# Altium footprint library Other.PcbLib: 67 footprints (part 2 of 5)
Each footprint in its own frame and in the unit in brackets; x right, y up, seen from the top. Pads: shape width x height; smd on the part's side, far side on the other; paste and mask are expansions set on the pad; w line width, h text height; cw(c..) or ccw(c..) is an arc to the next point about the centre after c.
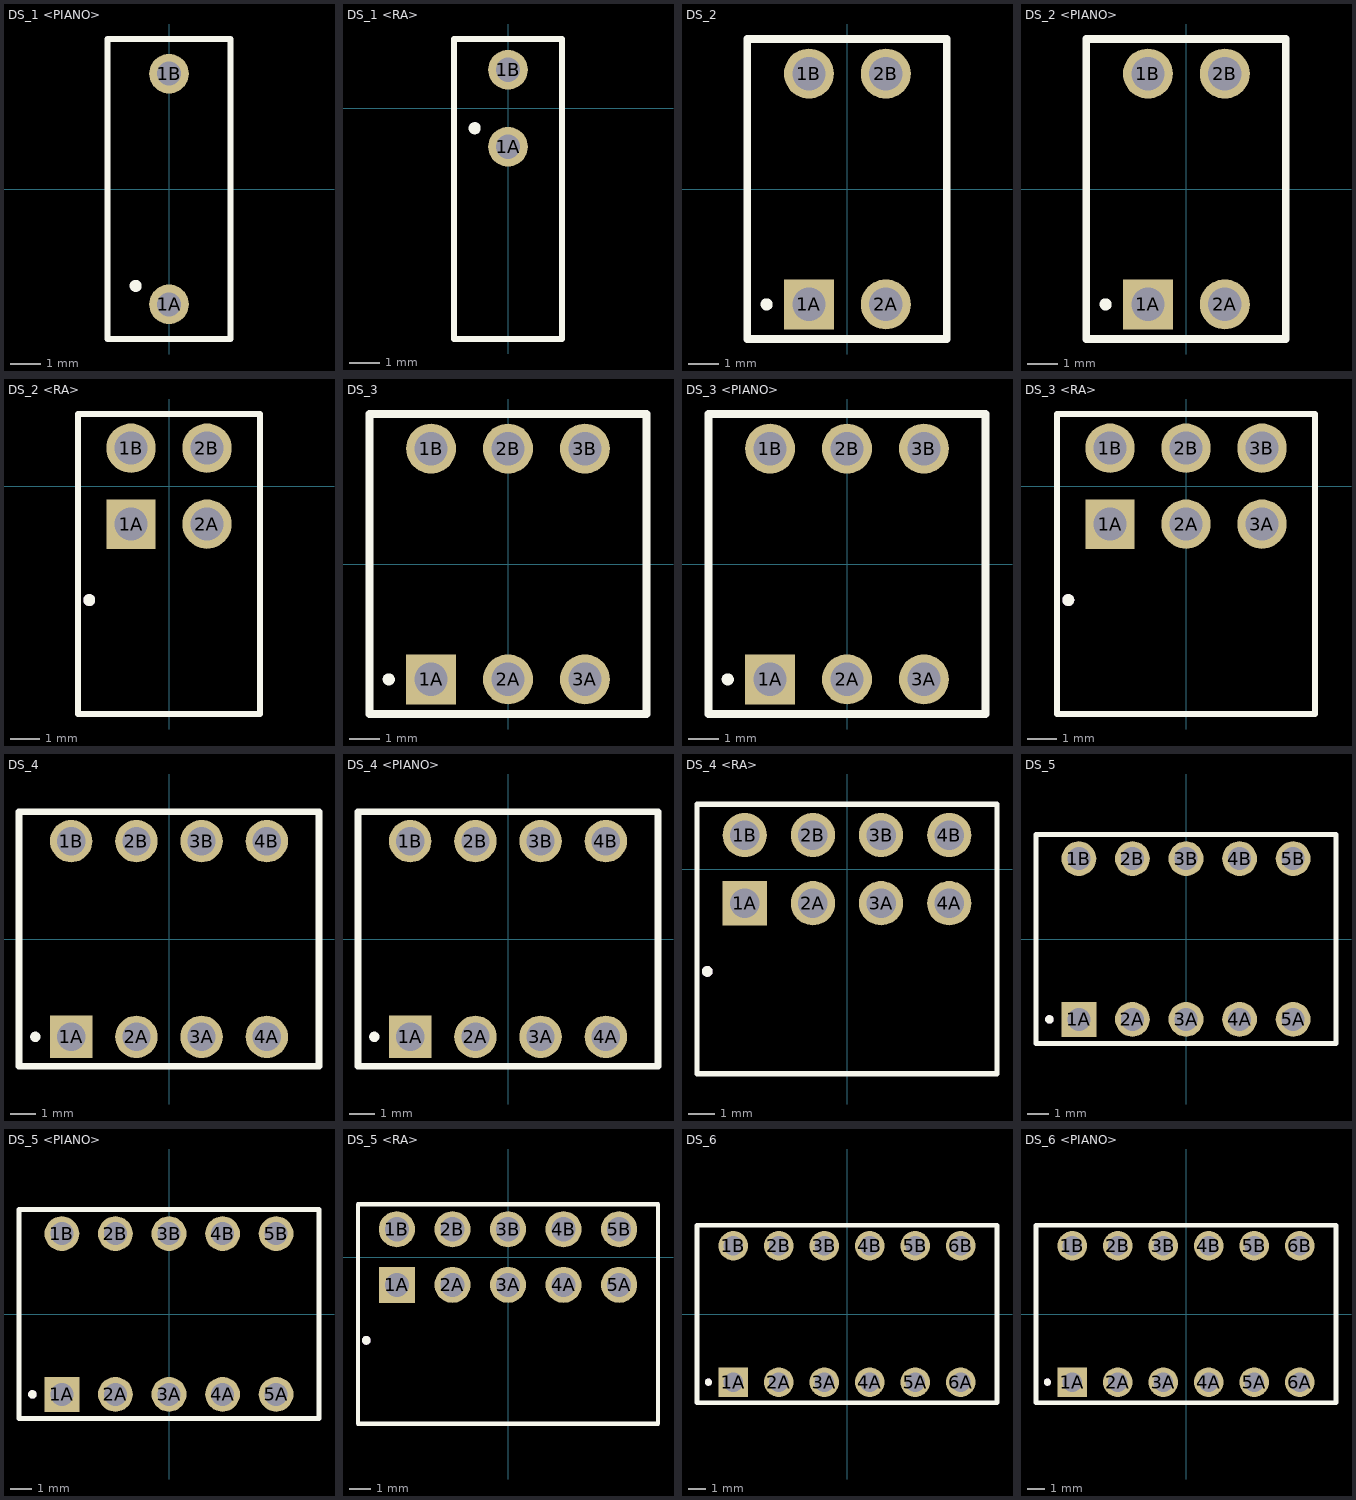
[diagram p1: the footprints below, top view; thin cyan lines are the x and y axes]

## DS_1 <PIANO> [mm]
pads (2):
  round 1.308 hole 0.8: 1A(0,-3.81) 1B(0,3.81)
Top Overlay:
  circle w0.2: c-1.1,-3.2 r0.1
  lines w0.2: -2.032,-4.953 -2.032,4.953 2.032,4.953 2.032,-4.953
  lines w0.203: -2.032,-4.953 2.032,-4.953
3D body "DS1040-01RT.STEP": height 8.8, standoff -3.85, extent -2,-6.45 2,4.95

## DS_1 <RA> [mm]
pads (2):
  round 1.308 hole 0.8: 1A(0,-1.27) 1B(0,1.27)
Top Overlay:
  circle w0.2: c-1.1,-0.66 r0.1
  lines w0.2: -1.778,-7.62 -1.778,2.286 1.778,2.286 1.778,-7.62
  lines w0.203: -1.778,-7.62 1.778,-7.62
3D body "DA01R.STEP": height 10.03, standoff -4.27, extent -1.77,-8.87 1.77,1.345

## DS_2 [mm]
height 7
pads (4):
  rect 1.65x1.65 hole 1.1: 1A(-1.27,-3.81)
  round 1.65 hole 1.1: 1B(-1.27,3.81) 2A(1.27,-3.81) 2B(1.27,3.81)
Top Overlay:
  circle w0.2: c-2.667,-3.81 r0.1
  lines w0.254: -3.302,-4.953 3.277,-4.953 3.277,4.953 -3.302,4.953 -3.302,-4.953
3D body "DS1040-02 (DIP_switch).stp": height 6.93, standoff -3.72, extent -3.27,-4.95 3.27,4.95

## DS_2 <PIANO> [mm]
height 7
pads (4):
  rect 1.65x1.65 hole 1.1: 1A(-1.27,-3.81)
  round 1.65 hole 1.1: 1B(-1.27,3.81) 2A(1.27,-3.81) 2B(1.27,3.81)
Top Overlay:
  circle w0.2: c-2.667,-3.81 r0.1
  lines w0.254: -3.302,-4.953 3.277,-4.953 3.277,4.953 -3.302,4.953 -3.302,-4.953
3D body "DS1040-02RT.STEP": height 8.8, standoff -3.85, extent -3.27,-6.45 3.27,4.95

## DS_2 <RA> [mm]
height 7
pads (4):
  rect 1.65x1.65 hole 1.1: 1A(-1.27,-1.27)
  round 1.65 hole 1.1: 1B(-1.27,1.27) 2A(1.27,-1.27) 2B(1.27,1.27)
Top Overlay:
  circle w0.2: c-2.667,-3.81 r0.1
  lines w0.2: -3.048,-7.62 -3.048,2.413 3.048,2.413 3.048,-7.62
  lines w0.203: -3.048,-7.62 3.048,-7.62
Mechanical 13:
  circle w0.2: c-2.667,-3.81 r0.1
3D body "DA02R.STEP": height 10.03, standoff -4.27, extent -3.04,-8.87 3.04,1.345

## DS_3 [mm]
height 7
pads (6):
  rect 1.65x1.65 hole 1.1: 1A(-2.54,-3.81)
  round 1.65 hole 1.1: 1B(-2.54,3.81) 2A(0,-3.81) 2B(0,3.81) 3A(2.54,-3.81) 3B(2.54,3.81)
Top Overlay:
  circle w0.2: c-3.937,-3.81 r0.1
  lines w0.254: -4.572,-4.953 4.572,-4.953 4.572,4.953 -4.572,4.953 -4.572,-4.953
3D body "DS1040-03 (DIP_switch).stp": height 6.93, standoff -3.72, extent -4.54,-4.95 4.54,4.95

## DS_3 <PIANO> [mm]
height 7
pads (6):
  rect 1.65x1.65 hole 1.1: 1A(-2.54,-3.81)
  round 1.65 hole 1.1: 1B(-2.54,3.81) 2A(0,-3.81) 2B(0,3.81) 3A(2.54,-3.81) 3B(2.54,3.81)
Top Overlay:
  circle w0.2: c-3.937,-3.81 r0.1
  lines w0.254: -4.572,-4.953 4.572,-4.953 4.572,4.953 -4.572,4.953 -4.572,-4.953
3D body "DS1040-03RT.STEP": height 8.8, standoff -3.85, extent -4.54,-6.45 4.54,4.95

## DS_3 <RA> [mm]
height 7
pads (6):
  rect 1.65x1.65 hole 1.1: 1A(-2.54,-1.27)
  round 1.65 hole 1.1: 1B(-2.54,1.27) 2A(0,-1.27) 2B(0,1.27) 3A(2.54,-1.27) 3B(2.54,1.27)
Top Overlay:
  circle w0.2: c-3.937,-3.81 r0.1
  lines w0.2: -4.318,-7.62 -4.318,2.413 4.318,2.413 4.318,-7.62
  lines w0.203: -4.318,-7.62 4.318,-7.62
Mechanical 13:
  circle w0.2: c-3.937,-3.81 r0.1
3D body "DA03R.STEP": height 9.9, standoff -4.4, extent -4.31,-8.87 4.31,1.345

## DS_4 [mm]
height 7
pads (8):
  rect 1.65x1.65 hole 1.1: 1A(-3.81,-3.81)
  round 1.65 hole 1.1: 1B(-3.81,3.81) 2A(-1.27,-3.81) 2B(-1.27,3.81) 3A(1.27,-3.81) 3B(1.27,3.81) 4A(3.81,-3.81) 4B(3.81,3.81)
Top Overlay:
  circle w0.2: c-5.207,-3.81 r0.1
  lines w0.254: -5.842,-4.953 -5.842,4.953 5.842,4.953 5.842,-4.953 -5.842,-4.953
3D body "DS1040-04 (DIP_switch).stp": height 6.93, standoff -3.72, extent -5.81,-4.95 5.81,4.95

## DS_4 <PIANO> [mm]
height 7
pads (8):
  rect 1.65x1.65 hole 1.1: 1A(-3.81,-3.81)
  round 1.65 hole 1.1: 1B(-3.81,3.81) 2A(-1.27,-3.81) 2B(-1.27,3.81) 3A(1.27,-3.81) 3B(1.27,3.81) 4A(3.81,-3.81) 4B(3.81,3.81)
Top Overlay:
  circle w0.2: c-5.207,-3.81 r0.1
  lines w0.254: -5.842,-4.953 5.842,-4.953 5.842,4.953 -5.842,4.953 -5.842,-4.953
3D body "DS1040-04RT.STEP": height 8.8, standoff -3.85, extent -5.81,-6.45 5.81,4.95

## DS_4 <RA> [mm]
height 7
pads (8):
  rect 1.65x1.65 hole 1.1: 1A(-3.81,-1.27)
  round 1.65 hole 1.1: 1B(-3.81,1.27) 2A(-1.27,-1.27) 2B(-1.27,1.27) 3A(1.27,-1.27) 3B(1.27,1.27) 4A(3.81,-1.27) 4B(3.81,1.27)
Top Overlay:
  circle w0.2: c-5.207,-3.81 r0.1
  lines w0.2: -5.588,-7.62 -5.588,2.413 5.588,2.413 5.588,-7.62
  lines w0.203: -5.588,-7.62 5.588,-7.62
Mechanical 13:
  circle w0.2: c-5.207,-3.81 r0.1
3D body "DA04R.STEP": height 9.9, standoff -4.4, extent -5.58,-8.87 5.58,1.345

## DS_5 [mm]
height 7
pads (10):
  rect 1.65x1.65 hole 1.1: 1A(-5.08,-3.81)
  round 1.65 hole 1.1: 1B(-5.08,3.81) 2A(-2.54,-3.81) 2B(-2.54,3.81) 3A(0,-3.81) 3B(0,3.81) 4A(2.54,-3.81) 4B(2.54,3.81) 5A(5.08,-3.81) 5B(5.08,3.81)
Top Overlay:
  circle w0.2: c-6.477,-3.81 r0.1
  lines w0.254: -7.112,-4.953 7.112,-4.953 7.112,4.953 -7.112,4.953 -7.112,-4.953
Mechanical 13:
  circle w0.2: c-6.477,-3.81 r0.1
3D body "DS1040-05 (DIP_switch).stp": height 6.93, standoff -3.72, extent -7.08,-4.95 7.08,4.95

## DS_5 <PIANO> [mm]
height 7
pads (10):
  rect 1.65x1.65 hole 1.1: 1A(-5.08,-3.81)
  round 1.65 hole 1.1: 1B(-5.08,3.81) 2A(-2.54,-3.81) 2B(-2.54,3.81) 3A(0,-3.81) 3B(0,3.81) 4A(2.54,-3.81) 4B(2.54,3.81) 5A(5.08,-3.81) 5B(5.08,3.81)
Top Overlay:
  circle w0.2: c-6.477,-3.81 r0.1
  lines w0.254: -7.112,-4.953 -7.112,4.953 7.112,4.953 7.112,-4.953 -7.112,-4.953
Mechanical 13:
  circle w0.2: c-6.477,-3.81 r0.1
3D body "DS1040-05RT.STEP": height 8.8, standoff -3.85, extent -7.08,-6.45 7.08,4.95

## DS_5 <RA> [mm]
height 7
pads (10):
  rect 1.65x1.65 hole 1.1: 1A(-5.08,-1.27)
  round 1.65 hole 1.1: 1B(-5.08,1.27) 2A(-2.54,-1.27) 2B(-2.54,1.27) 3A(0,-1.27) 3B(0,1.27) 4A(2.54,-1.27) 4B(2.54,1.27) 5A(5.08,-1.27) 5B(5.08,1.27)
Top Overlay:
  circle w0.2: c-6.477,-3.81 r0.1
  lines w0.2: -6.858,-7.62 -6.858,2.413 6.858,2.413 6.858,-7.62
  lines w0.203: -6.858,-7.62 6.858,-7.62
Mechanical 13:
  circle w0.2: c-6.477,-3.81 r0.1
3D body "DA05R.STEP": height 10.03, standoff -4.27, extent -6.85,-8.87 6.85,1.345

## DS_6 [mm]
height 7
pads (12):
  rect 1.65x1.65 hole 1.1: 1A(-6.35,-3.81)
  round 1.65 hole 1.1: 1B(-6.35,3.81) 2A(-3.81,-3.81) 2B(-3.81,3.81) 3A(-1.27,-3.81) 3B(-1.27,3.81) 4A(1.27,-3.81) 4B(1.27,3.81) 5A(3.81,-3.81) 5B(3.81,3.81) 6A(6.35,-3.81) 6B(6.35,3.81)
Top Overlay:
  circle w0.2: c-7.747,-3.81 r0.1
  lines w0.254: -8.382,-4.953 8.382,-4.953 8.382,4.953 -8.382,4.953 -8.382,-4.953
Mechanical 13:
  circle w0.2: c-7.747,-3.81 r0.1
3D body "DS1040-06 (DIP_switch).stp": height 6.93, standoff -3.72, extent -8.35,-4.95 8.35,4.95

## DS_6 <PIANO> [mm]
height 7
pads (12):
  rect 1.65x1.65 hole 1.1: 1A(-6.35,-3.81)
  round 1.65 hole 1.1: 1B(-6.35,3.81) 2A(-3.81,-3.81) 2B(-3.81,3.81) 3A(-1.27,-3.81) 3B(-1.27,3.81) 4A(1.27,-3.81) 4B(1.27,3.81) 5A(3.81,-3.81) 5B(3.81,3.81) 6A(6.35,-3.81) 6B(6.35,3.81)
Top Overlay:
  circle w0.2: c-7.747,-3.81 r0.1
  lines w0.254: -8.382,-4.953 -8.382,4.953 8.382,4.953 8.382,-4.953 -8.382,-4.953
Mechanical 13:
  circle w0.2: c-7.747,-3.81 r0.1
3D body "DS1040-06RT.STEP": height 8.8, standoff -3.85, extent -8.35,-6.45 8.35,4.95